# Altium schematic symbol library BQ51013BYFPR.SchLib: 1 symbol
Pins are listed as number, name and electrical type; pins without a type are passive.

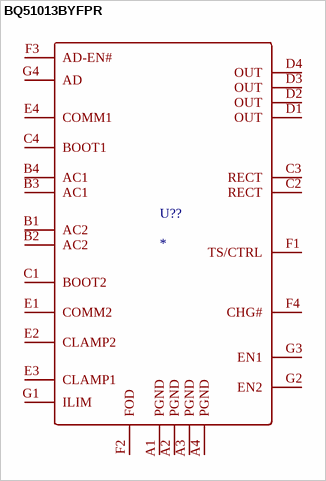
[diagram p0: symbol BQ51013BYFPR]

## BQ51013BYFPR
designator U??
footprint DSBGA-28_L3.0-W1.9-R7-C4-P0.40-BL
pins: A1 PGND, A2 PGND, A3 PGND, A4 PGND, B1 AC2, B2 AC2, B3 AC1, B4 AC1, C1 BOOT2, C2 RECT, C3 RECT, C4 BOOT1, D1 OUT, D2 OUT, D3 OUT, D4 OUT, E1 COMM2, E2 CLAMP2, E3 CLAMP1, E4 COMM1, F1 TS/CTRL, F2 FOD, F3 AD-EN#, F4 CHG#, G1 ILIM, G2 EN2, G3 EN1, G4 AD